# Altium schematic symbol library RNCF1206TKY1K00.SchLib: 1 symbol
Pins are listed as number, name and electrical type; pins without a type are passive.

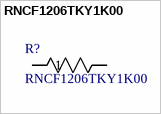
[diagram p0: symbol RNCF1206TKY1K00]

## RNCF1206TKY1K00
designator R?
Description; Manufacturer_Name: Stackpole International; Copyright: Copyright (C) 2026 Ultra Librarian. All rights reserved.; Manufacturer_Part_Number: RNCF1206TKY1K00
footprint STA_RNCF1206_STP
pins: 1, 2